# Altium footprint library ESP32-S31 CB V1.1.PcbLib: 28 footprints (part 2 of 2)
Each footprint in its own frame and in the unit in brackets; x right, y up, seen from the top. Pads: shape width x height; smd on the part's side, far side on the other; paste and mask are expansions set on the pad; w line width, h text height; cw(c..) or ccw(c..) is an arc to the next point about the centre after c.
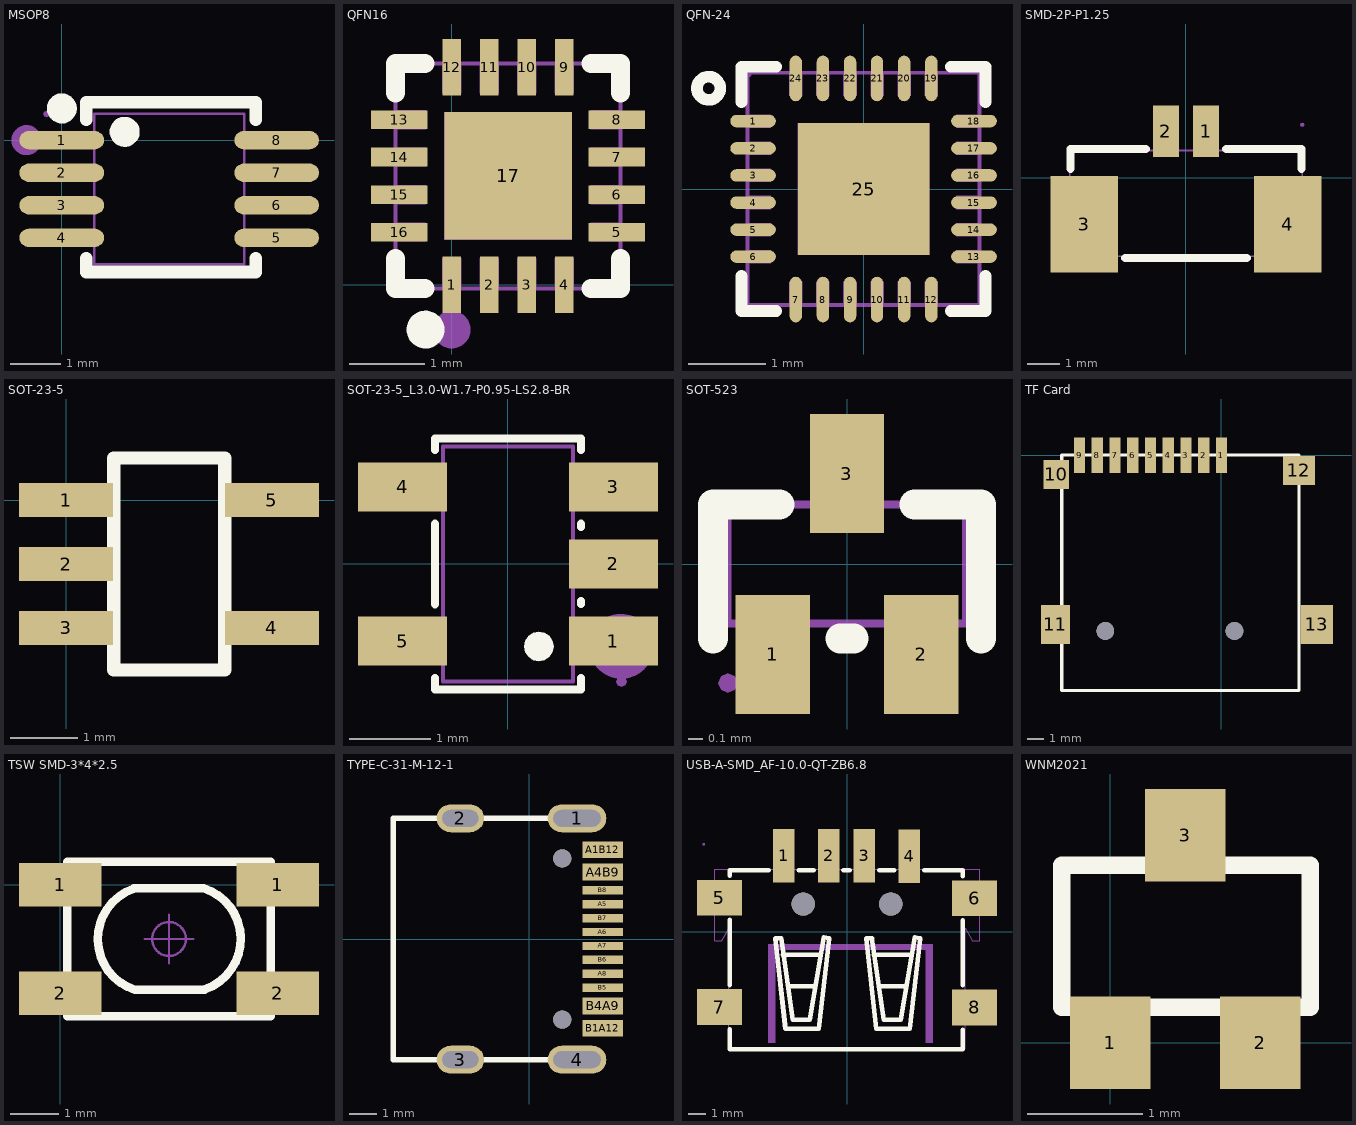
[diagram p1: the footprints below, top view; thin cyan lines are the x and y axes]

## MSOP8 [mm]
pads (8):
  oval 1.692x0.364 smd: 1(0,0) 2(0,-0.65) 3(0,-1.3) 4(0,-1.95) 5(4.292,-1.95) 6(4.292,-1.3) 7(4.292,-0.65) 8(4.292,0)
Top Overlay:
  circle w0.3: c1.257,0.168 r0.15
  circle w0.3: c0,0.634 r0.15
  lines w0.254: 0.488,-2.363 0.488,-2.634 3.876,-2.634 3.876,-2.363 ; 0.488,0.413 0.488,0.748 0.494,0.755 3.87,0.755 ; 3.856,0.742 3.876,0.722 3.876,0.413
Mechanical 6:
  circle w0.3: c-0.704,0 r0.15
Mechanical 15:
  region: -0.304,0.155 0.296,0.155 0.296,-0.155 -0.304,-0.155
  region: 0.286,0.155 0.656,0.155 0.656,-0.155 0.286,-0.155
  region: -0.304,-0.495 0.296,-0.495 0.296,-0.805 -0.304,-0.805
  region: 0.286,-0.495 0.656,-0.495 0.656,-0.805 0.286,-0.805
  region: -0.304,-1.145 0.296,-1.145 0.296,-1.455 -0.304,-1.455
  region: 0.286,-1.145 0.656,-1.145 0.656,-1.455 0.286,-1.455
  region: -0.304,-1.795 0.296,-1.795 0.296,-2.105 -0.304,-2.105
  region: 0.286,-1.795 0.656,-1.795 0.656,-2.105 0.286,-2.105
  region: 4.596,0.155 3.996,0.155 3.996,-0.155 4.596,-0.155
  region: 4.006,0.155 3.636,0.155 3.636,-0.155 4.006,-0.155
  region: 4.596,-0.495 3.996,-0.495 3.996,-0.805 4.596,-0.805
  region: 4.006,-0.495 3.636,-0.495 3.636,-0.805 4.006,-0.805
  region: 4.596,-1.145 3.996,-1.145 3.996,-1.455 4.596,-1.455
  region: 4.006,-1.145 3.636,-1.145 3.636,-1.455 4.006,-1.455
  region: 4.596,-1.795 3.996,-1.795 3.996,-2.105 4.596,-2.105
  region: 4.006,-1.795 3.636,-1.795 3.636,-2.105 4.006,-2.105
  region: -0.304,0.46 -0.259,0.479 -0.24,0.525 -0.259,0.571 -0.304,0.589 -0.349,0.571 -0.368,0.525 -0.349,0.479
  lines w0.051: 0.646,-2.475 3.646,-2.475 3.646,0.525 0.646,0.525 0.646,-2.475

## QFN16 [mm]
pads (17):
  rect 0.25x0.75 smd: 1(0,0) 2(0.5,0) 3(1,0) 4(1.5,0) 9(1.498,2.9) 10(0.998,2.9) 11(0.498,2.9) 12(-0.001,2.9)
  rect 0.75x0.25 smd: 5(2.198,0.7) 6(2.198,1.2) 7(2.198,1.7) 8(2.198,2.2) 13(-0.702,2.2) 14(-0.702,1.7) 15(-0.702,1.2) 16(-0.702,0.7)
  rect 1.7x1.7 smd: 17(0.749,1.45)
Top Overlay:
  circle w0.254: c-0.352,-0.6 r0.125
  lines w0.254: -0.751,0.346 -0.751,-0.05 -0.356,-0.05 ; -0.751,2.558 -0.751,2.95 -0.356,2.95 ; 1.855,2.95 2.249,2.95 2.249,2.558 ; 1.856,-0.05 2.249,-0.05 2.249,0.346
Top Paste:
  region: 0.069,2.13 1.429,2.13 1.429,0.77 0.069,0.77
  region: -0.327,2.075 -0.327,2.325 -1.077,2.325 -1.077,2.075
  region: -0.327,1.575 -0.327,1.825 -1.077,1.825 -1.077,1.575
  region: -0.327,1.075 -0.327,1.325 -1.077,1.325 -1.077,1.075
  region: -0.327,0.575 -0.327,0.825 -1.077,0.825 -1.077,0.575
  region: 2.573,2.075 2.573,2.325 1.823,2.325 1.823,2.075
  region: 2.573,1.575 2.573,1.825 1.823,1.825 1.823,1.575
  region: 2.573,1.075 2.573,1.325 1.823,1.325 1.823,1.075
  region: 2.573,0.575 2.573,0.825 1.823,0.825 1.823,0.575
  region: 0.124,3.275 -0.126,3.275 -0.126,2.525 0.124,2.525
  region: 0.624,3.275 0.374,3.275 0.374,2.525 0.624,2.525
  region: 1.124,3.275 0.874,3.275 0.874,2.525 1.124,2.525
  region: 1.624,3.275 1.374,3.275 1.374,2.525 1.624,2.525
  region: 0.125,0.375 -0.125,0.375 -0.125,-0.375 0.125,-0.375
  region: 0.625,0.375 0.375,0.375 0.375,-0.375 0.625,-0.375
  region: 1.125,0.375 0.875,0.375 0.875,-0.375 1.125,-0.375
  region: 1.625,0.375 1.375,0.375 1.375,-0.375 1.625,-0.375
Mechanical 6:
  circle w0.25: c-0.002,-0.6 r0.125
Mechanical 15:
  region: -0.687,-0.05 -0.706,-0.004 -0.752,0.015 -0.798,-0.004 -0.817,-0.05 -0.798,-0.096 -0.752,-0.115 -0.706,-0.096
  region: -0.352,0.825 -0.352,0.575 -0.752,0.575 -0.752,0.825
  region: -0.352,1.325 -0.352,1.075 -0.752,1.075 -0.752,1.325
  region: -0.352,1.825 -0.352,1.575 -0.752,1.575 -0.752,1.825
  region: -0.352,2.325 -0.352,2.075 -0.752,2.075 -0.752,2.325
  region: -0.126,2.95 0.124,2.95 0.124,2.55 -0.126,2.55
  region: 0.374,2.95 0.624,2.95 0.624,2.55 0.374,2.55
  region: 0.874,2.95 1.124,2.95 1.124,2.55 0.874,2.55
  region: 1.373,2.95 1.623,2.95 1.623,2.55 1.373,2.55
  region: 1.848,2.075 1.848,2.325 2.248,2.325 2.248,2.075
  region: 1.848,1.575 1.848,1.825 2.248,1.825 2.248,1.575
  region: 1.848,1.075 1.848,1.325 2.248,1.325 2.248,1.075
  region: 1.848,0.575 1.848,0.825 2.248,0.825 2.248,0.575
  region: 1.625,-0.05 1.375,-0.05 1.375,0.35 1.625,0.35
  region: 1.125,-0.05 0.875,-0.05 0.875,0.35 1.125,0.35
  region: 0.625,-0.05 0.375,-0.05 0.375,0.35 0.625,0.35
  region: 0.125,-0.05 -0.125,-0.05 -0.125,0.35 0.125,0.35
  region: -0.101,2.3 1.599,2.3 1.599,0.6 -0.101,0.6
  lines w0.051: -0.752,-0.05 2.248,-0.05 2.248,2.95 -0.752,2.95 -0.752,-0.05

## QFN-24 [mm]
pads (25):
  oval 0.589x0.16 smd: 1(-1.426,0.876) 2(-1.426,0.526) 3(-1.426,0.175) 4(-1.426,-0.175) 5(-1.426,-0.526) 6(-1.426,-0.874) 13(1.426,-0.874) 14(1.426,-0.526) 15(1.426,-0.175) 16(1.426,0.175) 17(1.426,0.526) 18(1.426,0.876)
  oval 0.16x0.589 smd: 7(-0.875,-1.427) 8(-0.525,-1.427) 9(-0.174,-1.427) 10(0.174,-1.427) 11(0.525,-1.427) 12(0.875,-1.427) 19(0.875,1.427) 20(0.525,1.427) 21(0.174,1.427) 22(-0.174,1.427) 23(-0.525,1.427) 24(-0.875,1.427)
  rect 1.699x1.699 smd: 25(0.001,0)
Top Overlay:
  circle w0.15: c-2,1.3 r0.15
  lines w0.152: -1.576,-1.125 -1.576,-1.575 -1.126,-1.575 ; -1.576,1.125 -1.576,1.577 -1.126,1.577 ; 1.126,-1.575 1.576,-1.575 1.576,-1.125 ; 1.126,1.577 1.576,1.577 1.576,1.125
Top Paste:
  drawing of 25 lines, arcs and shapes, not listed
Mechanical 6:
  lines w0.051: -1.5,-1.499 1.5,-1.499 1.5,1.501 -1.5,1.501 -1.5,-1.499
Mechanical 8:
  region: -1.434,1.501 -1.453,1.454 -1.5,1.435 -1.547,1.454 -1.566,1.501 -1.547,1.548 -1.5,1.567 -1.453,1.548
Mechanical 9:
  region: -0.959,1.501 -0.791,1.501 -0.791,1.201 -0.959,1.201
  region: -0.611,1.501 -0.441,1.501 -0.441,1.201 -0.611,1.201
  region: -0.26,1.501 -0.09,1.501 -0.09,1.201 -0.26,1.201
  region: 0.09,1.501 0.26,1.501 0.26,1.201 0.09,1.201
  region: 0.441,1.501 0.611,1.501 0.611,1.201 0.441,1.201
  region: 0.791,1.501 0.959,1.501 0.959,1.201 0.791,1.201
  region: 1.5,0.79 1.2,0.79 1.2,0.96 1.5,0.96
  region: 1.5,0.439 1.2,0.439 1.2,0.61 1.5,0.61
  region: 1.5,0.091 1.2,0.091 1.2,0.262 1.5,0.262
  region: 1.5,-0.259 1.2,-0.259 1.2,-0.089 1.5,-0.089
  region: 1.5,-0.61 1.2,-0.61 1.2,-0.439 1.5,-0.439
  region: 1.5,-0.96 1.2,-0.96 1.2,-0.79 1.5,-0.79
  region: 0.791,-1.499 0.959,-1.499 0.959,-1.199 0.791,-1.199
  region: 0.441,-1.499 0.611,-1.499 0.611,-1.199 0.441,-1.199
  region: 0.09,-1.499 0.26,-1.499 0.26,-1.199 0.09,-1.199
  region: -0.26,-1.499 -0.09,-1.499 -0.09,-1.199 -0.26,-1.199
  region: -0.611,-1.499 -0.441,-1.499 -0.441,-1.199 -0.611,-1.199
  region: -0.959,-1.499 -0.791,-1.499 -0.791,-1.199 -0.959,-1.199
  region: -1.5,-0.96 -1.2,-0.96 -1.2,-0.79 -1.5,-0.79
  region: -1.5,-0.61 -1.2,-0.61 -1.2,-0.439 -1.5,-0.439
  region: -1.5,-0.259 -1.2,-0.259 -1.2,-0.089 -1.5,-0.089
  region: -1.5,0.091 -1.2,0.091 -1.2,0.262 -1.5,0.262
  region: -1.5,0.439 -1.2,0.439 -1.2,0.61 -1.5,0.61
  region: -1.5,0.79 -1.2,0.79 -1.2,0.96 -1.5,0.96
  region: -0.85,0.851 0.85,0.851 0.85,-0.851 -0.85,-0.851

## SMD-2P-P1.25 [mm]
pads (4):
  rect 0.8x1.6 smd: 1(0.625,1.45) 2(-0.625,1.45)
  rect 2.1x3 smd: 3(-3.175,-1.45) 4(3.175,-1.45)
Top Overlay:
  lines w0.254: -3.6,0.281 -3.6,0.9 -1.256,0.9 ; -1.894,-2.5 1.894,-2.5 ; 1.256,0.9 3.6,0.9 3.6,0.281
Mechanical 6:
  region: 0.879,1.45 0.88,1.447 0.861,1.35 0.805,1.267 0.723,1.212 0.625,1.193 0.528,1.212 0.445,1.267 0.39,1.35 0.37,1.447 0.371,1.45 0.37,1.453 0.39,1.55 0.445,1.633 0.528,1.688 0.625,1.707 0.723,1.688 0.805,1.633 0.861,1.55 0.88,1.453
Mechanical 15:
  region: 3.56,1.65 3.579,1.696 3.625,1.715 3.671,1.696 3.69,1.65 3.671,1.604 3.625,1.585 3.579,1.604
  region: 3.625,-2.45 2.225,-2.45 2.225,-0.45 3.625,-0.45
  region: -2.225,-2.45 -3.625,-2.45 -3.625,-0.45 -2.225,-0.45
  region: 0.775,0.75 0.475,0.75 0.475,1.65 0.775,1.65
  region: -0.475,0.75 -0.775,0.75 -0.775,1.65 -0.475,1.65
  lines w0.051: -3.625,-2.45 -3.625,0.85 3.625,0.85 3.625,-2.45 -3.625,-2.45

## SOT-23-5 [mm]
pads (5):
  rect 1.4x0.5 smd: 1(0,0) 2(0,-0.95) 3(0,-1.9) 4(3.058,-1.9) 5(3.058,0)
Top Overlay:
  lines w0.2: 0.708,-2.371 0.708,0.625 2.358,0.625 2.358,-2.386 ; 0.708,-2.325 0.708,-2.525 2.358,-2.525 2.358,-2.3

## SOT-23-5_L3.0-W1.7-P0.95-LS2.8-BR [mm]
pads (5):
  rect 1.1x0.6 smd: 1(1.3,-0.95) 2(1.3,0) 3(1.3,0.95) 4(-1.3,0.95) 5(-1.3,-0.95)
Top Overlay:
  region: 0.201,-1.016 0.201,-1.014 0.214,-0.945 0.253,-0.886 0.312,-0.847 0.381,-0.833 0.45,-0.847 0.509,-0.886 0.548,-0.945 0.561,-1.014 0.561,-1.016 0.561,-1.018 0.548,-1.087 0.509,-1.146 0.45,-1.185 0.381,-1.199 0.312,-1.185 0.253,-1.146 0.214,-1.087 0.201,-1.018
  lines w0.1: -0.9,-1.404 -0.9,-1.55 0.9,-1.55 0.9,-1.404 ; -0.9,-0.496 -0.9,0.496 ; -0.9,1.404 -0.9,1.55 0.9,1.55 0.9,1.404 ; 0.9,-0.496 0.9,-0.454 ; 0.9,0.454 0.9,0.496
Mechanical 6:
  circle w0.4: c1.397,-1.016 r0.2
Mechanical 15:
  region: 1.465,-1.45 1.446,-1.404 1.4,-1.385 1.354,-1.404 1.335,-1.45 1.354,-1.496 1.4,-1.515 1.446,-1.496
  region: -1.4,-1.15 -1.4,-0.75 -0.95,-0.75 -0.95,-1.15
  region: -0.96,-1.15 -0.96,-0.75 -0.79,-0.75 -0.79,-1.15
  region: -1.4,0.75 -1.4,1.15 -0.95,1.15 -0.95,0.75
  region: -0.96,0.75 -0.96,1.15 -0.79,1.15 -0.79,0.75
  region: 0.95,0.75 0.95,1.15 1.4,1.15 1.4,0.75
  region: 0.79,0.75 0.79,1.15 0.96,1.15 0.96,0.75
  region: 0.95,-0.2 0.95,0.2 1.4,0.2 1.4,-0.2
  region: 0.79,-0.2 0.79,0.2 0.96,0.2 0.96,-0.2
  region: 0.95,-1.15 0.95,-0.75 1.4,-0.75 1.4,-1.15
  region: 0.79,-1.15 0.79,-0.75 0.96,-0.75 0.96,-1.15
  lines w0.051: -0.8,-1.45 -0.8,1.45 0.8,1.45 0.8,-1.45 -0.8,-1.45

## SOT-523 [mm]
pads (3):
  rect 0.5x0.8 smd: 1(-0.5,-0.608) 2(0.5,-0.608) 3(0,0.608)
Top Overlay:
  lines w0.2: -0.9,-0.5 -0.9,0.4 -0.454,0.4 ; -0.046,-0.5 0.046,-0.5 ; -0.019,-0.5 0.019,-0.5 ; 0.454,0.4 0.9,0.4 0.9,-0.4 ; 0.9,-0.4 0.9,-0.5 0.9,-0.4
Mechanical 15:
  region: -0.8,-0.865 -0.846,-0.846 -0.865,-0.8 -0.846,-0.754 -0.8,-0.735 -0.754,-0.754 -0.735,-0.8 -0.754,-0.846
  region: -0.625,-0.8 -0.625,-0.44 -0.375,-0.44 -0.375,-0.8
  region: -0.625,-0.45 -0.625,-0.39 -0.375,-0.39 -0.375,-0.45
  region: 0.375,-0.8 0.375,-0.44 0.625,-0.44 0.625,-0.8
  region: 0.375,-0.45 0.375,-0.39 0.625,-0.39 0.625,-0.45
  region: -0.125,0.44 -0.125,0.8 0.125,0.8 0.125,0.44
  region: -0.125,0.39 -0.125,0.45 0.125,0.45 0.125,0.39
  lines w0.051: -0.8,-0.4 -0.8,0.4 0.8,0.4 0.8,-0.4 -0.8,-0.4

## TF Card [mm]
pads (15):
  rect 0.7x2.2 smd: 1(0,0) 2(-1.1,0) 3(-2.2,0) 4(-3.3,0) 5(-4.4,0) 6(-5.5,0) 7(-6.6,0) 8(-7.7,0) 9(-8.8,0)
  rect 1.6x1.8 smd: 10(-10.25,-1.2)
  rect 1.8x2.4 smd: 11(-10.3,-10.5)
  rect 2x1.8 smd: 12(4.8,-0.95)
  rect 2x2.4 smd: 13(5.9,-10.5)
  round 1.1 hole 1.1: ""(-7.2,-10.9) ""(0.8,-10.9)
Top Overlay:
  lines w0.2: -9.9,-14.6 -9.9,0 4.8,0 4.8,-14.6 -9.9,-14.6

## TSW SMD-3*4*2.5 [mm]
pads (4):
  rect 1.7x0.9 smd: 1(0,0) 1(4.5,0) 2(0,-2.25) 2(4.5,-2.25)
Top Overlay:
  lines w0.178: 0.15,-2.725 4.35,-2.725 ; 0.15,-1.775 0.15,-0.475 ; 0.15,0.475 4.35,0.475 ; 1.512,-0.088 ccw(c1.878,-1.125) 1.55,-2.175 2.987,-2.175 ; 1.525,-0.075 2.962,-0.075 cw(c2.634,-1.125) 3,-2.162 ; 4.35,-1.775 4.35,-0.475
Mechanical 15:
  circle w0.05: c2.25,-1.125 r0.35
  lines w0.05: 1.75,-1.125 2.75,-1.125 ; 2.25,-1.625 2.25,-0.625

## TYPE-C-31-M-12-1 [mm]
pads (18):
  oval 2.1x1 hole 0.6 slot 1.7 at 0 deg: 1(1.707,4.325) 4(1.707,-4.325)
  oval 1.7x1 hole 0.6 slot 1.3 at 0 deg: 2(-2.472,4.325) 3(-2.472,-4.325)
  rect 1.45x0.6 smd: A1B12(2.622,3.2) A4B9(2.622,2.4) B1A12(2.622,-3.2) B4A9(2.622,-2.4)
  rect 1.45x0.3 smd: A5(2.622,1.25) A6(2.622,0.25) A7(2.622,-0.25) A8(2.622,-1.25) B5(2.622,-1.75) B6(2.622,-0.75) B7(2.622,0.75) B8(2.622,1.75)
  round 0.65 hole 0.65 unplated: ""(1.178,-2.89) ""(1.178,2.89)
Top Overlay:
  lines w0.2: 1.707,-4.325 -2.472,-4.325 -4.88,-4.325 -4.88,4.325 -2.472,4.325 1.707,4.325

## USB-A-SMD_AF-10.0-QT-ZB6.8 [mm]
pads (10):
  rect 1.2x3 smd: 1(-3.528,4.238) 2(-1.028,4.238) 3(0.972,4.238) 4(3.472,4.212)
  rect 2.5x2 smd: 5(-7.122,1.888) 6(7.128,1.862) 7(-7.128,-4.212) 8(7.128,-4.238)
  round 1.3 hole 1.3: ""(-2.45,1.54) ""(2.45,1.541)
Top Overlay:
  lines w0.254: -6.547,-5.443 -6.547,-6.562 6.453,-6.562 6.453,-5.469 ; -6.547,-2.981 -6.547,0.657 ; -6.547,3.119 -6.547,3.438 -4.359,3.438 ; -3.587,-1.292 -1.504,-1.292 ; -3.257,-3.045 -1.809,-3.045 ; -2.697,3.438 -1.859,3.438 ; -0.197,3.438 0.141,3.438 ; 1.493,-1.292 3.576,-1.292 ; 1.803,3.438 2.641,3.438 ; 1.823,-3.045 3.271,-3.045 ; 4.303,3.438 6.453,3.438 6.453,3.093 ; 6.453,-3.007 6.453,0.631 ; -4.015,-0.385 -3.435,-5.432 ; -4.015,-0.385 -3.435,-5.432 ; -4.015,-0.385 -3.684,-0.36 ; -3.684,-0.36 -3.028,-4.924 ; -3.684,-0.36 -3.028,-4.924 ; -3.435,-5.432 -1.581,-5.432 ; -3.435,-5.432 -1.581,-5.432 ; -3.028,-4.924 -2.089,-4.924 ; -3.028,-4.924 -2.089,-4.924 ; -2.089,-4.924 -1.301,-0.327 ; -2.089,-4.924 -1.301,-0.327 ; -1.581,-5.432 -0.996,-0.378 ; -1.581,-5.432 -0.996,-0.378 ; -1.301,-0.327 -0.996,-0.378 ; 1.065,-0.385 1.645,-5.432 ; 1.065,-0.385 1.396,-0.36 ; 1.065,-0.385 1.645,-5.432 ; 1.396,-0.36 2.052,-4.924 ; 1.396,-0.36 2.052,-4.924 ; 1.645,-5.432 3.499,-5.432 ; 1.645,-5.432 3.499,-5.432 ; 2.052,-4.924 2.991,-4.924 ; 2.052,-4.924 2.991,-4.924 ; 2.991,-4.924 3.779,-0.327 ; 2.991,-4.924 3.779,-0.327 ; 3.499,-5.432 4.084,-0.378 ; 3.499,-5.432 4.084,-0.378 ; 3.779,-0.327 4.084,-0.378
Mechanical 6:
  region: -4.397,-6.2 -4.397,-0.7 4.803,-0.7 4.803,-6.2 4.403,-6.2 4.403,-1 -3.997,-1 -3.997,-6.2
Mechanical 15:
  drawing of 20 lines, arcs and shapes, not listed

## WNM2021 [mm]
pads (3):
  rect 0.7x0.8 smd: 1(0,0) 2(1.3,0) 3(0.65,1.8)
Top Overlay:
  lines w0.15: -0.42,0.309 1.458,0.309 1.733,0.309 1.733,1.538 -0.42,1.538 -0.42,0.309